# Altium footprint library AVP32F335_EVM_Rev1.0.PcbLib: 50 footprints (part 1 of 4)
Each footprint in its own frame and in the unit in brackets; x right, y up, seen from the top. Pads: shape width x height; smd on the part's side, far side on the other; paste and mask are expansions set on the pad; w line width, h text height; cw(c..) or ccw(c..) is an arc to the next point about the centre after c.
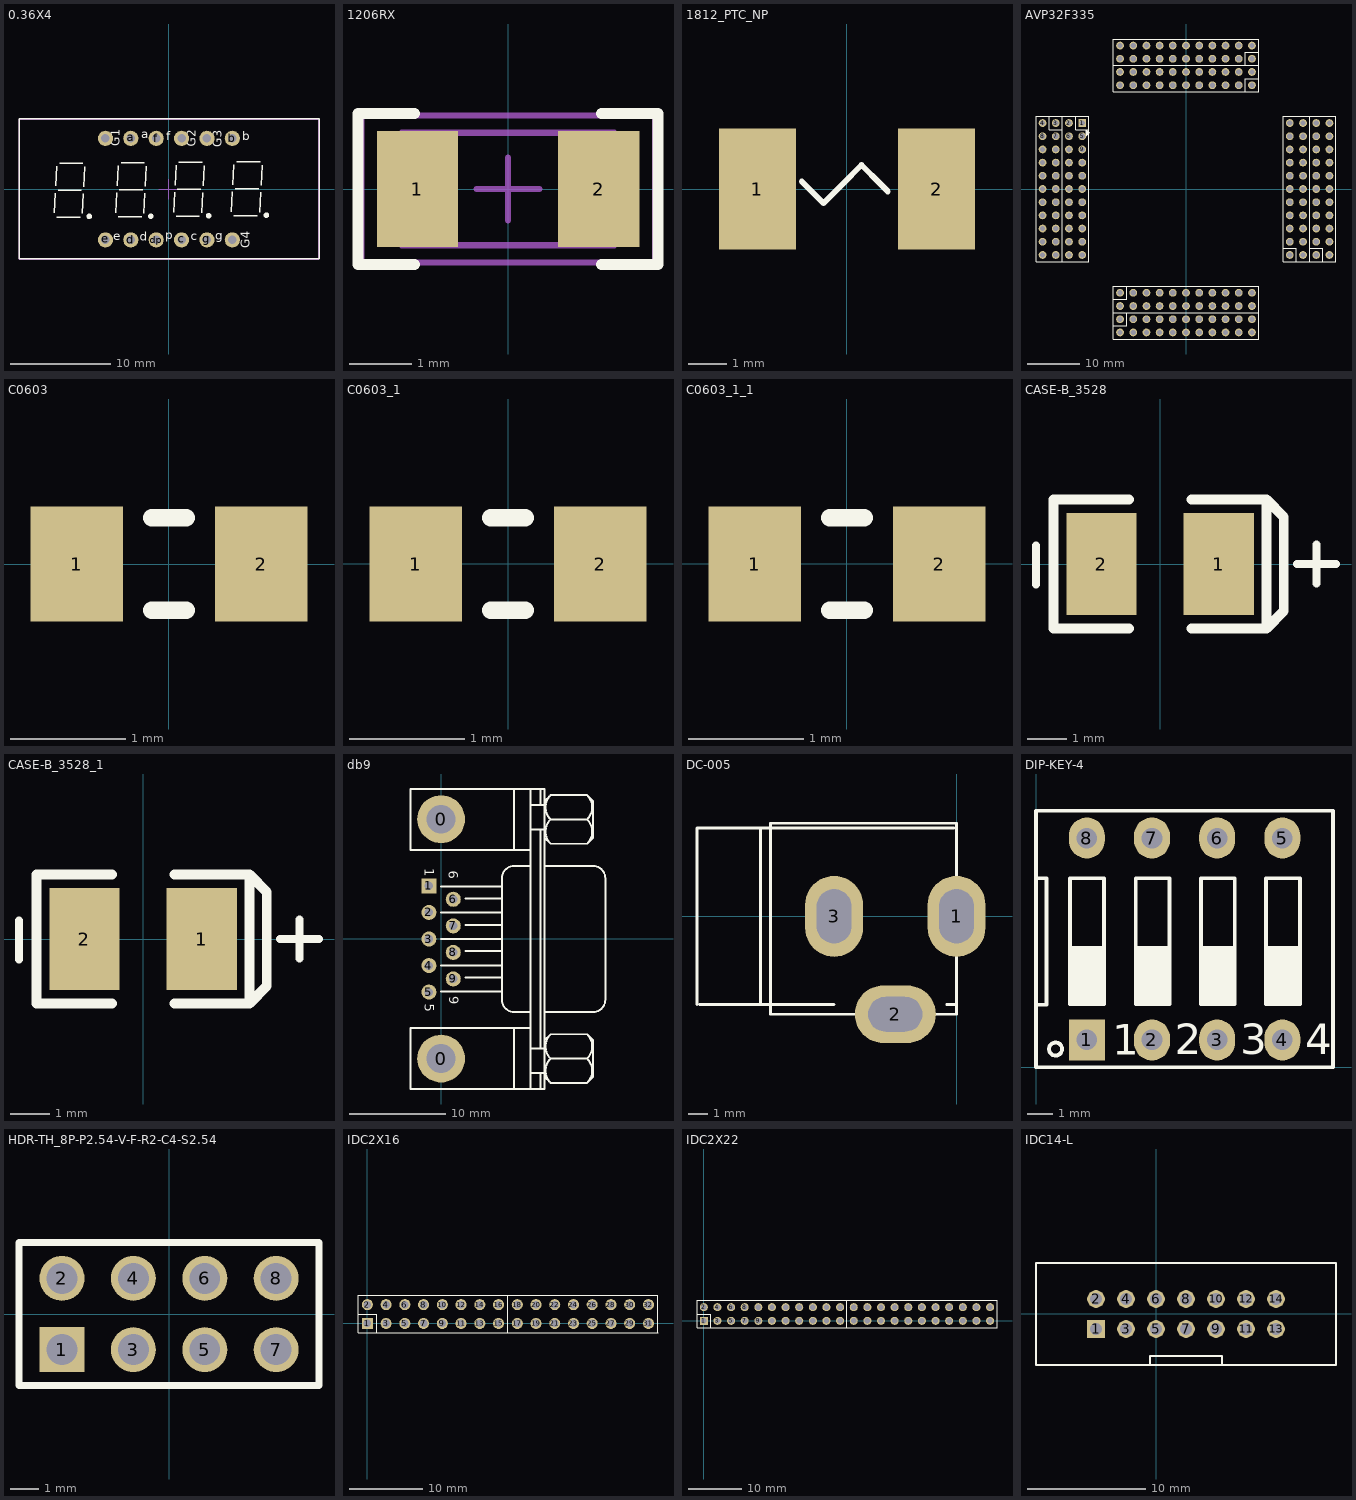
[diagram p0: the footprints below, top view; thin cyan lines are the x and y axes]

## 0.36X4 [mil] "4位0.36寸数码管"
height 314.96
pads (12):
  round 60 hole 33.46: a(-150,200) b(250,200) c(50,-200) com1(-250,200) com2(50,200) com3(150,200) com4(250,-200) d(-150,-200) dp(-50,-200) e(-250,-200) f(-50,200) g(150,-200)
Top Overlay:
  circle w19.68: c-313.58,-107.74 r1
  circle w19.68: c-71.58,-106.74 r1
  circle w19.68: c156.42,-104.74 r1
  circle w19.68: c384.42,-102.74 r1
  lines w5.91: -451.58,-93.74 -447.58,-15.74 ; -445.58,12.26 -441.58,90.26 ; -441.58,-110.74 -349.58,-110.74 ; -436.58,-3.74 -344.58,-3.74 ; -430.58,102.26 -338.58,102.26 ; -340.58,-95.74 -336.58,-17.74 ; -334.58,10.26 -330.58,88.26 ; -209.58,-92.74 -205.58,-14.74 ; -203.58,13.26 -199.58,91.26 ; -199.58,-109.74 -107.58,-109.74 ; -194.58,-2.74 -102.58,-2.74 ; -188.58,103.26 -96.58,103.26 ; -98.58,-94.74 -94.58,-16.74 ; -92.58,11.26 -88.58,89.26 ; 18.42,-90.74 22.42,-12.74 ; 24.42,15.26 28.42,93.26 ; 28.42,-107.74 120.42,-107.74 ; 33.42,-0.74 125.42,-0.74 ; 39.42,105.26 131.42,105.26 ; 129.42,-92.74 133.42,-14.74 ; 135.42,13.26 139.42,91.26 ; 246.42,-88.74 250.42,-10.74 ; 252.42,17.26 256.42,95.26 ; 256.42,-105.74 348.42,-105.74 ; 261.42,1.26 353.42,1.26 ; 267.42,107.26 359.42,107.26 ; 357.42,-90.74 361.42,-12.74 ; 363.42,15.26 367.42,93.26 ; -589.58,-274.74 591.52,-274.74 591.52,276.44 -589.58,276.44 -589.58,-274.74
  text "G4" at 330.42,-233.74 h60
  text "p" at -13.58,-208.74 h60
  text "g" at 183.42,-211.74 h60
  text "f" at -10.58,181.26 h60
  text "e" at -218.58,-212.74 h60
  text "d" at -115.58,-214.74 h60
  text "c" at 85.42,-213.74 h60
  text "G3" at 219.42,165.26 h60
  text "G2" at 118.42,166.26 h60
  text "G1" at -182.58,169.26 h60
  text "a" at -109.58,188.26 h60
  text "b" at 288.42,180.26 h60
Mechanical 13:
  lines w3.94: -590.55,-275.59 -590.55,275.59 590.55,275.59 590.55,-275.59 -590.55,-275.59
Mechanical 15:
  lines w3.94: -39.37,0 39.37,0 ; 0,-39.37 0,39.37
3D body "nixie36-4a.stp": height 283.46, standoff -118.11, extent -590.56,-275.99 590.54,275.58

## 1206RX [mm]
pads (2):
  rect 1.3x1.85 smd: 1(-1.45,0) 2(1.45,0)
Top Overlay:
  lines w0.178: -1.5,-1.21 -2.4,-1.21 -2.4,1.21 -1.5,1.21 ; 1.5,-1.21 2.4,-1.21 2.4,1.21 1.5,1.21
Mechanical 5:
  lines w0.1: -1.7,-0.9 1.7,-0.9 ; -1.7,0.9 1.7,0.9
Mechanical 13:
  lines w0.1: -1.7,-0.9 1.7,-0.9 ; -1.7,0.9 1.7,0.9
Mechanical 15:
  lines w0.1: -0.5,0 0.5,0 ; 0,-0.5 0,0.5 ; -2.35,-1.175 -2.35,1.175 2.35,1.175 2.35,-1.175 -2.35,-1.175
3D body "R1206.STEP": height 0.6, standoff 0, extent -1.571,-0.8 1.629,0.8

## 1812_PTC_NP [mil]
height 47.24
pads (2):
  rect 80x125 smd: 1(-92.5,0) 2(92.5,0)
Top Overlay:
  lines w6: -46.74,7.76 -24.28,-14.69 15.09,24.68 34.77,5 ; -4.77,5 14.91,24.68 42.05,-2.45
3D body "User Library-0ZCG-0_90mm.step": height 19.84, standoff 0.16, extent -83.57,-62.99 93.59,63

## AVP32F335 [mm]
height 0.9
pads (176):
  rect 1.5x1.5 hole 1: 1(-20,12.7)
  round 1.5 hole 1: 2(-22.54,12.7) 3(-25.08,12.7) 4(-27.62,12.7) 5(-20,10.16) 6(-22.54,10.16) 7(-25.08,10.16) 8(-27.62,10.16) 9(-20,7.62) 10(-22.54,7.62) 11(-25.08,7.62) 12(-27.62,7.62) 13(-20,5.08) 14(-22.54,5.08) 15(-25.08,5.08) 16(-27.62,5.08) 17(-20,2.54) 18(-22.54,2.54) 19(-25.08,2.54) 20(-27.62,2.54) 21(-20,0) 22(-22.54,0) 23(-25.08,0) 24(-27.62,0) 25(-20,-2.54) 26(-22.54,-2.54) 27(-25.08,-2.54) 28(-27.62,-2.54) 29(-20,-5.08) 30(-22.54,-5.08) 31(-25.08,-5.08) 32(-27.62,-5.08) 33(-20,-7.62) 34(-22.54,-7.62) 35(-25.08,-7.62) 36(-27.62,-7.62) 37(-20,-10.16) 38(-22.54,-10.16) 39(-25.08,-10.16) 40(-27.62,-10.16) 41(-20,-12.7) 42(-22.54,-12.7) 43(-25.08,-12.7) 44(-27.62,-12.7) 45(-12.7,-20) 46(-12.7,-22.54) 47(-12.7,-25.08) 48(-12.7,-27.62) 49(-10.16,-20) 50(-10.16,-22.54) 51(-10.16,-25.08) 52(-10.16,-27.62) 53(-7.62,-20) 54(-7.62,-22.54) 55(-7.62,-25.08) 56(-7.62,-27.62) 57(-5.08,-20) 58(-5.08,-22.54) 59(-5.08,-25.08) 60(-5.08,-27.62) 61(-2.54,-20) 62(-2.54,-22.54) 63(-2.54,-25.08) 64(-2.54,-27.62) 65(0,-20) 66(0,-22.54) 67(0,-25.08) 68(0,-27.62) 69(2.54,-20) 70(2.54,-22.54) 71(2.54,-25.08) 72(2.54,-27.62) 73(5.08,-20) 74(5.08,-22.54) 75(5.08,-25.08) 76(5.08,-27.62) 77(7.62,-20) 78(7.62,-22.54) 79(7.62,-25.08) 80(7.62,-27.62) 81(10.16,-20) 82(10.16,-22.54) 83(10.16,-25.08) 84(10.16,-27.62) 85(12.7,-20) 86(12.7,-22.54) 87(12.7,-25.08) 88(12.7,-27.62) 89(20,-12.7) 90(22.54,-12.7) 91(25.08,-12.7) 92(27.62,-12.7) 93(20,-10.16) 94(22.54,-10.16) 95(25.08,-10.16) 96(27.62,-10.16) 97(20,-7.62) 98(22.54,-7.62) 99(25.08,-7.62) 100(27.62,-7.62) 101(20,-5.08) 102(22.54,-5.08) 103(25.08,-5.08) 104(27.62,-5.08) 105(20,-2.54) 106(22.54,-2.54) 107(25.08,-2.54) 108(27.62,-2.54) 109(20,0) 110(22.54,0) 111(25.08,0) 112(27.62,0) 113(20,2.54) 114(22.54,2.54) 115(25.08,2.54) 116(27.62,2.54) 117(20,5.08) 118(22.54,5.08) 119(25.08,5.08) 120(27.62,5.08) 121(20,7.62) 122(22.54,7.62) 123(25.08,7.62) 124(27.62,7.62) 125(20,10.16) 126(22.54,10.16) 127(25.08,10.16) 128(27.62,10.16) 129(20,12.7) 130(22.54,12.7) 131(25.08,12.7) 132(27.62,12.7) 133(12.7,20) 134(12.7,22.54) 135(12.7,25.08) 136(12.7,27.62) 137(10.16,20) 138(10.16,22.54) 139(10.16,25.08) 140(10.16,27.62) 141(7.62,20) 142(7.62,22.54) 143(7.62,25.08) 144(7.62,27.62) 145(5.08,20) 146(5.08,22.54) 147(5.08,25.08) 148(5.08,27.62) 149(2.54,20) 150(2.54,22.54) 151(2.54,25.08) 152(2.54,27.62) 153(0,20) 154(0,22.54) 155(0,25.08) 156(0,27.62) 157(-2.54,20) 158(-2.54,22.54) 159(-2.54,25.08) 160(-2.54,27.62) 161(-5.08,20) 162(-5.08,22.54) 163(-5.08,25.08) 164(-5.08,27.62) 165(-7.62,20) 166(-7.62,22.54) 167(-7.62,25.08) 168(-7.62,27.62) 169(-10.16,20) 170(-10.16,22.54) 171(-10.16,25.08) 172(-10.16,27.62) 173(-12.7,20) 174(-12.7,22.54) 175(-12.7,25.08) 176(-12.7,27.62)
Top Overlay:
  lines w0.15: -26.35,13.97 -26.35,11.43 -23.81,11.43 ; -21.27,13.97 -21.27,11.43 -18.73,11.43 ; -13.97,-26.35 -11.43,-26.35 -11.43,-23.81 ; -13.97,-21.27 -11.43,-21.27 -11.43,-18.73 ; 11.43,18.73 11.43,21.27 13.97,21.27 ; 11.43,23.81 11.43,26.35 13.97,26.35 ; 18.73,-11.43 21.27,-11.43 21.27,-13.97 ; 23.81,-11.43 26.35,-11.43 26.35,-13.97 ; -28.89,-13.97 -28.89,13.97 -23.81,13.97 ; -28.89,-13.97 -23.81,-13.97 ; -28.89,-13.97 -23.81,-13.97 ; -23.81,-13.97 -23.81,13.97 ; -23.81,-13.97 -18.73,-13.97 ; -23.81,-13.97 -18.73,-13.97 ; -23.81,-13.97 -23.81,13.97 ; -23.81,13.97 -18.73,13.97 -18.73,-13.97 ; -13.97,-23.81 -13.97,-18.73 13.97,-18.73 ; -13.97,-23.81 13.97,-23.81 ; -13.97,-23.81 13.97,-23.81 ; -13.97,-23.81 -13.97,-28.89 13.97,-28.89 ; -13.97,18.73 13.97,18.73 13.97,23.81 ; -13.97,18.73 -13.97,23.81 ; -13.97,18.73 -13.97,23.81 ; -13.97,23.81 13.97,23.81 ; -13.97,23.81 -13.97,28.89 ; -13.97,23.81 -13.97,28.89 ; -13.97,23.81 13.97,23.81 ; -13.97,28.89 13.97,28.89 13.97,23.81 ; 13.97,-28.89 13.97,-23.81 ; 13.97,-28.89 13.97,-23.81 ; 13.97,-23.81 13.97,-18.73 ; 13.97,-23.81 13.97,-18.73 ; 18.73,13.97 18.73,-13.97 23.81,-13.97 ; 18.73,13.97 23.81,13.97 ; 18.73,13.97 23.81,13.97 ; 23.81,-13.97 23.81,13.97 ; 23.81,-13.97 23.81,13.97 ; 23.81,-13.97 28.89,-13.97 28.89,13.97 ; 23.81,13.97 28.89,13.97 ; 23.81,13.97 28.89,13.97
  lines w0.2: -19.177,10.679 -19.05,10.806 -18.669,10.806 ; -19.05,10.469 -19.05,11.187 -19.177,11.314 ; -18.923,10.552 -18.923,10.933 -18.86,10.997 ; -19.177,11.314 -18.669,10.806 ; -19.177,11.314 -19.177,10.298 -18.669,10.806

## C0603 [mm] "无丝印       D=1.6"
height 1.2
pads (2):
  rect 0.8x1 smd mask+0.051: 1(-0.8,0) 2(0.8,0)
Top Overlay:
  lines w0.152: -0.15,-0.4 0.15,-0.4 ; -0.15,0.4 0.15,0.4
3D body "User Library-CAP0603-1.STEP": height 0.68, standoff -0.08, extent -0.711,-0.381 0.813,0.381

## C0603_1 [mm] "无丝印       D=1.6"
height 1.2
pads (2):
  rect 0.8x1 smd: 1(-0.8,0) 2(0.8,0)
Top Overlay:
  lines w0.152: -0.15,-0.4 0.15,-0.4 ; -0.15,0.4 0.15,0.4
3D body "User Library-CAP0603-1.STEP": height 0.68, standoff -0.08, extent -0.711,-0.381 0.813,0.381

## C0603_1_1 [mm] "无丝印       D=1.6"
height 1.2
pads (2):
  rect 0.8x1 smd: 1(-0.8,0) 2(0.8,0)
Top Overlay:
  lines w0.152: -0.15,-0.4 0.15,-0.4 ; -0.15,0.4 0.15,0.4
3D body "User Library-CAP0603-1.STEP": height 0.68, standoff -0.08, extent -0.711,-0.381 0.813,0.381

## CASE-B_3528 [mm]
height 10
pads (2):
  rect 1.8x2.6 smd: 1(1.5,0) 2(-1.5,0)
Top Overlay:
  lines w0.203: -3.175,-0.525 -3.175,0.475 ; 3.5,0 4.5,0 ; 4,-0.5 4,0.5
  lines w0.254: -0.8,-1.65 -2.727,-1.65 -2.727,1.65 -0.8,1.65 ; 0.8,-1.65 2.727,-1.65 ; 0.8,1.65 2.727,1.65 ; 2.727,-1.65 2.727,1.65 ; 2.727,-1.65 3.163,-1.2 3.163,1.2 2.727,1.65
3D body "User Library-AVX_BCASE.STEP": height 2.03, standoff 0, extent -1.85,-1.465 1.85,1.465

## CASE-B_3528_1 [mm]
height 10
pads (2):
  rect 1.8x2.6 smd: 1(1.5,0) 2(-1.5,0)
Top Overlay:
  lines w0.203: -3.175,-0.525 -3.175,0.475 ; 3.5,0 4.5,0 ; 4,-0.5 4,0.5
  lines w0.254: -0.8,-1.65 -2.727,-1.65 -2.727,1.65 -0.8,1.65 ; 0.8,-1.65 2.727,-1.65 ; 0.8,1.65 2.727,1.65 ; 2.727,-1.65 3.163,-1.2 3.163,1.2 2.727,1.65 ; 2.727,-1.65 2.727,1.65
3D body "User Library-AVX_BCASE.STEP": height 2.03, standoff 0, extent -1.85,-1.465 1.85,1.465

## db9 [mil]
height 393.7
pads (11):
  round 196.67 hole 118.33: 0(0,-492.08) 0(0,492.08)
  rect 62x62 hole 35: 1(-50,217.92)
  round 62 hole 35: 2(-50,108.75) 3(-50,-0.42) 4(-50,-109.58) 5(-50,-218.75) 6(50,162.92) 7(50,53.75) 8(50,-55.42) 9(50,-164.58)
Top Overlay:
  lines w8: 0,-217.08 250,-217.08 ; 0,-108.75 250,-108.75 ; 0,-0.42 250,-0.42 ; 0,107.92 250,107.92 ; 0,216.25 250,216.25 ; 100,-158.75 250,-158.75 ; 100,-50.42 250,-50.42 ; 100,57.92 250,57.92 ; 100,166.25 250,166.25 ; 300,-617.08 300,-367.08 ; 300,366.25 300,616.25 ; 366.67,-617.08 366.67,616.25 ; 366.67,-550.42 425,-550.42 ; 366.67,-450.42 425,-450.42 ; 366.67,-367.08 -125,-367.08 -125,-617.08 425,-617.08 425,616.25 -125,616.25 -125,366.25 366.67,366.25 ; 366.67,-300.42 300,-300.42 cw(c300,-250.42) 250,-250.42 250,249.58 cw(c300,249.58) 300,299.58 366.67,299.58 ; 366.67,449.58 425,449.58 ; 366.67,549.58 425,549.58 ; 408.33,-617.08 408.33,-550.42 ; 408.33,-450.42 408.33,449.58 ; 408.33,549.58 408.33,616.25 ; 425,-567.08 450,-592.08 600,-592.08 625,-567.08 625,-417.08 600,-392.08 450,-392.08 425,-417.08 ; 425,-300.42 625,-300.42 ccw(c625,-250.42) 675,-250.42 675,249.58 ccw(c625,249.58) 625,299.58 425,299.58 ; 425,416.25 450,391.25 600,391.25 625,416.25 625,566.25 600,591.25 450,591.25 425,566.25 ; 449.91,-592.17 cw(c500,-542.08) 449.91,-492 ; 449.91,-492.17 cw(c500,-442.08) 449.91,-392 ; 449.91,391.16 cw(c500,441.25) 449.91,491.34 ; 449.91,491.16 cw(c500,541.25) 449.91,591.34 ; 450,-492.08 600,-492.08 ; 450,491.25 600,491.25 ; 600.09,-592.17 ccw(c550,-542.08) 600.09,-492 ; 600.09,-492.17 ccw(c550,-442.08) 600.09,-392 ; 600.09,391.16 ccw(c550,441.25) 600.09,491.34 ; 600.09,491.16 ccw(c550,541.25) 600.09,591.34
  text "6" at 30.79,280.16 h39.37
  text "1" at -68.21,291.16 h39.37
  text "5" at -68.21,-266.84 h39.37
  text "9" at 32.79,-235.84 h39.37
3D body "DB-Male.STEP": height 124.02, standoff -521.65, extent -107.74,-601 549.74,599.79

## DC-005 [mm] "接口大小9X11MM    5.5-2.1mm  孔径1.8/2.8"
height 11
pads (3):
  oval 3x4.2 hole 1.8 slot 2.8 at 90 deg: 1(0,0) 3(-6.35,0)
  oval 4.2x3 hole 1.8 slot 2.8 at 0 deg: 2(-3.175,-5.08)
Top Overlay:
  lines w0.15: -13.462,-4.572 -13.462,4.572 -0.127,4.572 ; -13.335,-4.572 -6.35,-4.572 ; -10.16,-4.572 -10.16,4.572 ; -0.508,-4.572 0,-4.572 0,-2.54 ; 0,2.54 0,4.572 ; -9.652,-5.08 -9.652,4.826 0,4.826 0,-5.08 -9.652,-5.08
3D body "User Library-CON-077.step": height 11, standoff -4.05, extent -13.703,-5.024 0.447,4.56

## DIP-KEY-4 [mm]
pads (8):
  rect 1.4x1.6 hole 0.8: 1(1.98,1.065)
  oval 1.4x1.6 hole 0.8: 2(4.52,1.065) 3(7.06,1.065) 4(9.6,1.065) 5(9.6,8.935) 6(7.06,8.935) 7(4.52,8.935) 8(1.98,8.935)
Top Overlay:
  circle w0.15: c0.762,0.711 r0.254
  rectangle: 1.323,2.464 2.644,4.724
  rectangle: 3.886,2.464 5.207,4.724
  rectangle: 6.426,2.464 7.747,4.724
  rectangle: 8.966,2.464 10.287,4.724
  lines w0.15: 0,2.438 0.406,2.438 0.406,7.366 0,7.366 ; 0,0 11.58,0 11.58,10 0,10 0,0 ; 1.323,2.464 2.644,2.464 2.644,7.366 1.323,7.366 1.323,2.464 ; 3.886,2.464 5.207,2.464 5.207,7.366 3.886,7.366 3.886,2.464 ; 6.426,2.464 6.426,7.366 7.747,7.366 7.747,2.464 6.426,2.464 ; 8.966,2.464 8.966,7.366 10.287,7.366 10.287,2.464 8.966,2.464
  text "1" at 2.972,0.483 h1.2
  text "2" at 5.41,0.508 h1.2
  text "3" at 7.95,0.508 h1.2
  text "4" at 10.49,0.508 h1.2
3D body "User Library-DIPSWITCH-2.step": height 6.9, standoff -3.2, extent -0.05,-0.08 6.55,10.08

## HDR-TH_8P-P2.54-V-F-R2-C4-S2.54 [mm]
pads (8):
  rect 1.6x1.6 hole 1.1: 1(-3.81,-1.27)
  round 1.6 hole 1.1: 2(-3.81,1.27) 3(-1.27,-1.27) 4(-1.27,1.27) 5(1.27,-1.27) 6(1.27,1.27) 7(3.81,-1.27) 8(3.81,1.27)
Top Overlay:
  lines w0.254: -5.334,-2.54 5.334,-2.54 5.334,2.54 -5.334,2.54 -5.334,-2.54
Mechanical 15:
  region: -5.22,-2.46 -5.22,-2.485 -5.255,-2.52 -5.305,-2.52 -5.34,-2.485 -5.34,-2.46 -5.34,-2.435 -5.305,-2.4 -5.255,-2.4 -5.22,-2.435 -5.22,-2.46
  region: 3.49,1.47 4.13,1.47 4.13,1.07 3.49,1.07
  region: 3.49,-1.07 4.13,-1.07 4.13,-1.47 3.49,-1.47
  region: 0.95,1.47 1.59,1.47 1.59,1.07 0.95,1.07
  region: 0.95,-1.07 1.59,-1.07 1.59,-1.47 0.95,-1.47
  region: -1.59,1.47 -0.95,1.47 -0.95,1.07 -1.59,1.07
  region: -1.59,-1.07 -0.95,-1.07 -0.95,-1.47 -1.59,-1.47
  region: -4.13,1.47 -3.49,1.47 -3.49,1.07 -4.13,1.07
  region: -4.13,-1.07 -3.49,-1.07 -3.49,-1.47 -4.13,-1.47
  lines w0.051: -5.28,-2.46 5.28,-2.46 5.28,2.54 -5.28,2.54 -5.28,-2.46

## IDC2X16 [mm] "2.54X40P双排插针"
height 0.9
pads (32):
  rect 1.5x1.5 hole 1: 1(0,0)
  round 1.5 hole 1: 2(0,2.54) 3(2.54,0) 4(2.54,2.54) 5(5.08,0) 6(5.08,2.54) 7(7.62,0) 8(7.62,2.54) 9(10.16,0) 10(10.16,2.54) 11(12.7,0) 12(12.7,2.54) 13(15.24,0) 14(15.24,2.54) 15(17.78,0) 16(17.78,2.54) 17(20.32,0) 18(20.32,2.54) 19(22.86,0) 20(22.86,2.54) 21(25.4,0) 22(25.4,2.54) 23(27.94,0) 24(27.94,2.54) 25(30.48,0) 26(30.48,2.54) 27(33.02,0) 28(33.02,2.54) 29(35.56,0) 30(35.56,2.54) 31(38.1,0) 32(38.1,2.54)
Top Overlay:
  lines w0.15: -1.27,1.27 1.27,1.27 1.27,-1.27 ; 19.05,-1.27 19.05,3.81 ; 24.13,-1.265 -1.27,-1.27 -1.27,3.81 24.13,3.82 ; 24.155,-1.27 39.397,-1.264 ; 24.155,3.81 39.395,3.816 ; 39.395,-1.27 39.395,3.81
3D body "User Library-PLD-xx.step": height 8.4, standoff -3, extent -1.233,-1.23 16.547,3.77
3D body "User Library-PLD-xx.step": height 8.4, standoff -3, extent 6.401,-1.179 24.181,3.821
3D body "User Library-PLD-xx.step": height 8.4, standoff -3, extent 21.615,-1.23 39.395,3.77

## IDC2X22 [mm] "2.54X40P双排插针"
pads (44):
  rect 1.5x1.5 hole 1: 1(0,0)
  round 1.5 hole 1: 2(0,2.54) 3(2.54,0) 4(2.54,2.54) 5(5.08,0) 6(5.08,2.54) 7(7.62,0) 8(7.62,2.54) 9(10.16,0) 10(10.16,2.54) 11(12.7,0) 12(12.7,2.54) 13(15.24,0) 14(15.24,2.54) 15(17.78,0) 16(17.78,2.54) 17(20.32,0) 18(20.32,2.54) 19(22.86,0) 20(22.86,2.54) 21(25.4,0) 22(25.4,2.54) 23(27.94,0) 24(27.94,2.54) 25(30.48,0) 26(30.48,2.54) 27(33.02,0) 28(33.02,2.54) 29(35.56,0) 30(35.56,2.54) 31(38.1,0) 32(38.1,2.54) 33(40.64,0) 34(40.64,2.54) 35(43.18,0) 36(43.18,2.54) 37(45.72,0) 38(45.72,2.54) 39(48.26,0) 40(48.26,2.54) 41(50.8,0) 42(50.8,2.54) 43(53.34,0) 44(53.34,2.54)
Top Overlay:
  lines w0.15: -1.27,1.27 1.27,1.27 1.27,-1.27 ; 24.13,-1.265 -1.27,-1.27 -1.27,3.81 24.13,3.82 ; 24.155,-1.27 54.635,-1.264 54.635,3.822 24.155,3.81 ; 26.67,-1.27 26.67,3.81 ; 54.635,-1.27 54.635,3.81
3D body "User Library-PLD-xx.step": height 8.4, standoff -3, extent 24.192,-1.205 41.972,3.795
3D body "User Library-PLD-xx.step": height 8.4, standoff -3, extent 31.826,-1.154 49.606,3.846
3D body "User Library-PLD-xx.step": height 8.4, standoff -3, extent 6.401,-1.179 24.181,3.821
3D body "User Library-PLD-xx.step": height 8.4, standoff -3, extent -1.233,-1.23 16.547,3.77
3D body "User Library-PLD-xx.step": height 8.4, standoff -3, extent 36.906,-1.154 54.686,3.846

## IDC14-L [mm]
pads (14):
  rect 1.5x1.5 hole 1: 1(-5.084,-1.29)
  round 1.5 hole 1: 2(-5.084,1.25) 3(-2.544,-1.29) 4(-2.544,1.25) 5(-0.004,-1.29) 6(-0.004,1.25) 7(2.536,-1.29) 8(2.536,1.25) 9(5.076,-1.29) 10(5.076,1.25) 11(7.616,-1.29) 12(7.616,1.25) 13(10.156,-1.29) 14(10.156,1.25)
Top Overlay:
  lines w0.15: -0.512,-4.338 -0.512,-3.576 5.584,-3.576 5.584,-4.338 ; -10.164,-4.338 15.236,-4.338 15.236,4.298 -10.164,4.298 -10.164,-4.338
3D body "User Library-SLS-014-S920-01.step": height 9.1, standoff -3.2, extent -10.184,-4.465 15.256,4.645